# Altium footprint library 排母.PcbLib: 66 footprints (part 3 of 5)
Each footprint in its own frame and in the unit in brackets; x right, y up, seen from the top. Pads: shape width x height; smd on the part's side, far side on the other; paste and mask are expansions set on the pad; w line width, h text height; cw(c..) or ccw(c..) is an arc to the next point about the centre after c.
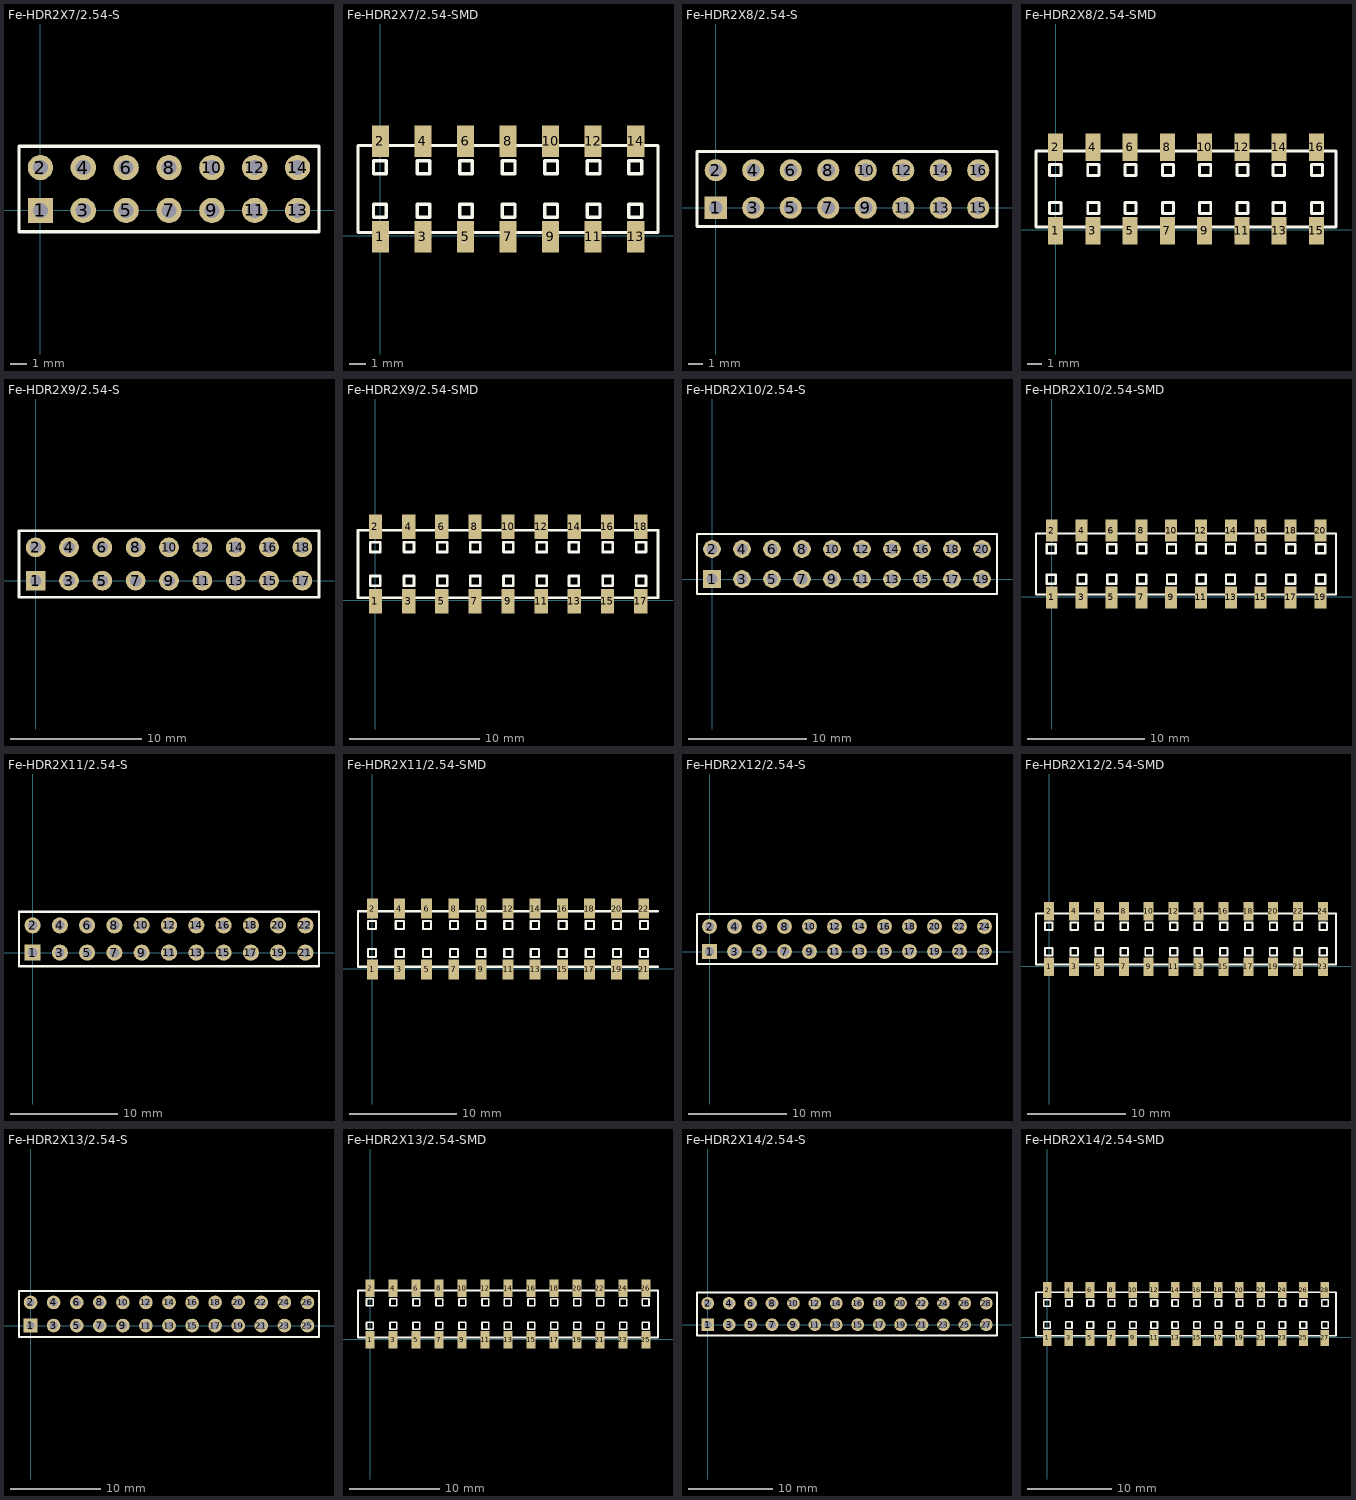
[diagram p2: the footprints below, top view; thin cyan lines are the x and y axes]

## Fe-HDR2X7/2.54-S [mm] "Connector; Header; 7x2 Position"
pads (14):
  rect 1.5x1.5 hole 0.9: 1(0,0)
  round 1.5 hole 0.9: 2(0,2.54) 3(2.54,0) 4(2.54,2.54) 5(5.08,0) 6(5.08,2.54) 7(7.62,0) 8(7.62,2.54) 9(10.16,0) 10(10.16,2.54) 11(12.7,0) 12(12.7,2.54) 13(15.24,0) 14(15.24,2.54)
Top Overlay:
  lines w0.2: -1.27,-1.27 -1.27,3.81 16.51,3.81 16.51,-1.27 -1.27,-1.27
3D body "Female-Header-2.54-Double-14.stp": height 8.5, standoff -3.2, extent -1.397,-1.19 16.633,3.81

## Fe-HDR2X7/2.54-SMD [mm]
pads (14):
  rect 1.02x1.9 smd: 1(0,-0.056) 2(0,5.644) 3(2.54,-0.056) 4(2.54,5.644) 5(5.08,-0.056) 6(5.08,5.644) 7(7.62,-0.056) 8(7.62,5.644) 9(10.16,-0.056) 10(10.16,5.644) 11(12.7,-0.056) 12(12.7,5.644) 13(15.24,-0.056) 14(15.24,5.644)
Top Overlay:
  lines w0.2: -1.34,0.194 16.57,0.194 16.57,5.394 -1.34,5.394 -1.34,0.194 ; -0.411,1.113 -0.411,1.875 0.351,1.875 0.351,1.113 -0.411,1.113 ; -0.411,3.713 -0.411,4.475 0.351,4.475 0.351,3.713 -0.411,3.713 ; 2.189,1.113 2.189,1.875 2.951,1.875 2.951,1.113 2.189,1.113 ; 2.189,3.713 2.189,4.475 2.951,4.475 2.951,3.713 2.189,3.713 ; 4.729,1.113 5.491,1.113 5.491,1.875 4.729,1.875 4.729,1.113 ; 4.729,3.713 5.491,3.713 5.491,4.475 4.729,4.475 4.729,3.713 ; 7.269,1.113 7.269,1.875 8.031,1.875 8.031,1.113 7.269,1.113 ; 7.269,3.713 7.269,4.475 8.031,4.475 8.031,3.713 7.269,3.713 ; 9.809,1.113 9.809,1.875 10.571,1.875 10.571,1.113 9.809,1.113 ; 9.809,3.713 9.809,4.475 10.571,4.475 10.571,3.713 9.809,3.713 ; 12.349,1.113 12.349,1.875 13.111,1.875 13.111,1.113 12.349,1.113 ; 12.349,3.713 12.349,4.475 13.111,4.475 13.111,3.713 12.349,3.713 ; 14.829,1.113 15.591,1.113 15.591,1.875 14.829,1.875 14.829,1.113 ; 14.829,3.713 15.591,3.713 15.591,4.475 14.829,4.475 14.829,3.713
3D body "Fe-Header2X1.STEP": height 5.15, standoff 0, extent 3.75,-0.304 6.35,6.096
3D body "Fe-Header2X1.STEP": height 5.15, standoff 0, extent 1.21,-0.304 3.81,6.096
3D body "Fe-Header2X1.STEP": height 5.15, standoff 0, extent -1.33,-0.304 1.27,6.096
3D body "Fe-Header2X1.STEP": height 5.15, standoff 0, extent 8.83,-0.304 11.43,6.096
3D body "Fe-Header2X1.STEP": height 5.15, standoff 0, extent 6.29,-0.304 8.89,6.096
3D body "Fe-Header2X1.STEP": height 5.15, standoff 0, extent 11.37,-0.304 13.97,6.096
3D body "Fe-Header2X1.STEP": height 5.15, standoff 0, extent 13.91,-0.304 16.51,6.096

## Fe-HDR2X8/2.54-S [mm] "Connector; Header; 8x2 Position"
pads (16):
  rect 1.5x1.5 hole 0.9: 1(0,0)
  round 1.5 hole 0.9: 2(0,2.54) 3(2.54,0) 4(2.54,2.54) 5(5.08,0) 6(5.08,2.54) 7(7.62,0) 8(7.62,2.54) 9(10.16,0) 10(10.16,2.54) 11(12.7,0) 12(12.7,2.54) 13(15.24,0) 14(15.24,2.54) 15(17.78,0) 16(17.78,2.54)
Top Overlay:
  lines w0.2: -1.27,-1.27 -1.27,3.81 19.05,3.81 19.05,-1.27 -1.27,-1.27
3D body "Female-Header-2.54-Double-16.stp": height 8.5, standoff -3.2, extent -1.395,-1.23 19.175,3.77

## Fe-HDR2X8/2.54-SMD [mm]
pads (16):
  rect 1.02x1.9 smd: 1(0,-0.056) 2(0,5.644) 3(2.54,-0.056) 4(2.54,5.644) 5(5.08,-0.056) 6(5.08,5.644) 7(7.62,-0.056) 8(7.62,5.644) 9(10.16,-0.056) 10(10.16,5.644) 11(12.7,-0.056) 12(12.7,5.644) 13(15.24,-0.056) 14(15.24,5.644) 15(17.78,-0.056) 16(17.78,5.644)
Top Overlay:
  lines w0.2: -1.34,0.194 -1.34,5.394 19.11,5.394 19.11,0.194 -1.34,0.194 ; -0.411,1.113 -0.411,1.875 0.351,1.875 0.351,1.113 -0.411,1.113 ; -0.411,3.713 -0.411,4.475 0.351,4.475 0.351,3.713 -0.411,3.713 ; 2.189,1.113 2.189,1.875 2.951,1.875 2.951,1.113 2.189,1.113 ; 2.189,3.713 2.189,4.475 2.951,4.475 2.951,3.713 2.189,3.713 ; 4.729,1.113 5.491,1.113 5.491,1.875 4.729,1.875 4.729,1.113 ; 4.729,3.713 5.491,3.713 5.491,4.475 4.729,4.475 4.729,3.713 ; 7.269,1.113 7.269,1.875 8.031,1.875 8.031,1.113 7.269,1.113 ; 7.269,3.713 7.269,4.475 8.031,4.475 8.031,3.713 7.269,3.713 ; 9.809,1.113 9.809,1.875 10.571,1.875 10.571,1.113 9.809,1.113 ; 9.809,3.713 9.809,4.475 10.571,4.475 10.571,3.713 9.809,3.713 ; 12.349,1.113 12.349,1.875 13.111,1.875 13.111,1.113 12.349,1.113 ; 12.349,3.713 12.349,4.475 13.111,4.475 13.111,3.713 12.349,3.713 ; 14.829,1.113 15.591,1.113 15.591,1.875 14.829,1.875 14.829,1.113 ; 14.829,3.713 15.591,3.713 15.591,4.475 14.829,4.475 14.829,3.713 ; 17.429,1.113 18.191,1.113 18.191,1.875 17.429,1.875 17.429,1.113 ; 17.429,3.713 18.191,3.713 18.191,4.475 17.429,4.475 17.429,3.713
3D body "Fe-Header2X1.STEP": height 5.15, standoff 0, extent 13.91,-0.304 16.51,6.096
3D body "Fe-Header2X1.STEP": height 5.15, standoff 0, extent 11.37,-0.304 13.97,6.096
3D body "Fe-Header2X1.STEP": height 5.15, standoff 0, extent 6.29,-0.304 8.89,6.096
3D body "Fe-Header2X1.STEP": height 5.15, standoff 0, extent 8.83,-0.304 11.43,6.096
3D body "Fe-Header2X1.STEP": height 5.15, standoff 0, extent -1.33,-0.304 1.27,6.096
3D body "Fe-Header2X1.STEP": height 5.15, standoff 0, extent 1.21,-0.304 3.81,6.096
3D body "Fe-Header2X1.STEP": height 5.15, standoff 0, extent 3.75,-0.304 6.35,6.096
3D body "Fe-Header2X1.STEP": height 5.15, standoff 0, extent 16.45,-0.304 19.05,6.096

## Fe-HDR2X9/2.54-S [mm] "Connector; Header; 9x2 Position"
pads (18):
  rect 1.5x1.5 hole 0.9: 1(0,0)
  round 1.5 hole 0.9: 2(0,2.54) 3(2.54,0) 4(2.54,2.54) 5(5.08,0) 6(5.08,2.54) 7(7.62,0) 8(7.62,2.54) 9(10.16,0) 10(10.16,2.54) 11(12.7,0) 12(12.7,2.54) 13(15.24,0) 14(15.24,2.54) 15(17.78,0) 16(17.78,2.54) 17(20.32,0) 18(20.32,2.54)
Top Overlay:
  lines w0.2: -1.27,-1.27 -1.27,3.81 21.59,3.81 21.59,-1.27 -1.27,-1.27
3D body "Female-Header-2.54-Double-18.stp": height 8.5, standoff -3.2, extent -1.397,-1.19 21.713,3.81

## Fe-HDR2X9/2.54-SMD [mm]
pads (18):
  rect 1.02x1.9 smd: 1(0,-0.056) 2(0,5.644) 3(2.54,-0.056) 4(2.54,5.644) 5(5.08,-0.056) 6(5.08,5.644) 7(7.62,-0.056) 8(7.62,5.644) 9(10.16,-0.056) 10(10.16,5.644) 11(12.7,-0.056) 12(12.7,5.644) 13(15.24,-0.056) 14(15.24,5.644) 15(17.78,-0.056) 16(17.78,5.644) 17(20.32,-0.056) 18(20.32,5.644)
Top Overlay:
  lines w0.2: -1.34,0.194 -1.34,5.394 21.65,5.394 21.65,0.194 -1.34,0.194 ; -0.411,1.113 0.351,1.113 0.351,1.875 -0.411,1.875 -0.411,1.113 ; -0.411,3.713 0.351,3.713 0.351,4.475 -0.411,4.475 -0.411,3.713 ; 2.189,1.113 2.951,1.113 2.951,1.875 2.189,1.875 2.189,1.113 ; 2.189,3.713 2.951,3.713 2.951,4.475 2.189,4.475 2.189,3.713 ; 4.729,1.113 4.729,1.875 5.491,1.875 5.491,1.113 4.729,1.113 ; 4.729,3.713 4.729,4.475 5.491,4.475 5.491,3.713 4.729,3.713 ; 7.269,1.113 8.031,1.113 8.031,1.875 7.269,1.875 7.269,1.113 ; 7.269,3.713 8.031,3.713 8.031,4.475 7.269,4.475 7.269,3.713 ; 9.809,1.113 10.571,1.113 10.571,1.875 9.809,1.875 9.809,1.113 ; 9.809,3.713 10.571,3.713 10.571,4.475 9.809,4.475 9.809,3.713 ; 12.349,1.113 13.111,1.113 13.111,1.875 12.349,1.875 12.349,1.113 ; 12.349,3.713 13.111,3.713 13.111,4.475 12.349,4.475 12.349,3.713 ; 14.829,1.113 14.829,1.875 15.591,1.875 15.591,1.113 14.829,1.113 ; 14.829,3.713 14.829,4.475 15.591,4.475 15.591,3.713 14.829,3.713 ; 17.429,1.113 17.429,1.875 18.191,1.875 18.191,1.113 17.429,1.113 ; 17.429,3.713 17.429,4.475 18.191,4.475 18.191,3.713 17.429,3.713 ; 19.969,1.113 20.731,1.113 20.731,1.875 19.969,1.875 19.969,1.113 ; 19.969,3.713 20.731,3.713 20.731,4.475 19.969,4.475 19.969,3.713
3D body "Fe-Header2X1.STEP": height 5.15, standoff 0, extent 18.99,-0.304 21.59,6.096
3D body "Fe-Header2X1.STEP": height 5.15, standoff 0, extent 16.45,-0.304 19.05,6.096
3D body "Fe-Header2X1.STEP": height 5.15, standoff 0, extent 13.91,-0.304 16.51,6.096
3D body "Fe-Header2X1.STEP": height 5.15, standoff 0, extent 11.37,-0.304 13.97,6.096
3D body "Fe-Header2X1.STEP": height 5.15, standoff 0, extent 6.29,-0.304 8.89,6.096
3D body "Fe-Header2X1.STEP": height 5.15, standoff 0, extent 8.83,-0.304 11.43,6.096
3D body "Fe-Header2X1.STEP": height 5.15, standoff 0, extent -1.33,-0.304 1.27,6.096
3D body "Fe-Header2X1.STEP": height 5.15, standoff 0, extent 1.21,-0.304 3.81,6.096
3D body "Fe-Header2X1.STEP": height 5.15, standoff 0, extent 3.75,-0.304 6.35,6.096

## Fe-HDR2X10/2.54-S [mm] "Connector; Header; 10x2 Position"
pads (20):
  rect 1.5x1.5 hole 0.9: 1(0,0)
  round 1.5 hole 0.9: 2(0,2.54) 3(2.54,0) 4(2.54,2.54) 5(5.08,0) 6(5.08,2.54) 7(7.62,0) 8(7.62,2.54) 9(10.16,0) 10(10.16,2.54) 11(12.7,0) 12(12.7,2.54) 13(15.24,0) 14(15.24,2.54) 15(17.78,0) 16(17.78,2.54) 17(20.32,0) 18(20.32,2.54) 19(22.86,0) 20(22.86,2.54)
Top Overlay:
  lines w0.2: -1.27,-1.27 -1.27,3.81 0.635,3.81 24.13,3.81 24.13,-1.27 0.635,-1.27 -1.27,-1.27
3D body "Female-Header-2.54-Double-20.stp": height 8.5, standoff -3.2, extent -1.395,-1.23 24.255,3.77

## Fe-HDR2X10/2.54-SMD [mm]
pads (20):
  rect 1.02x1.9 smd: 1(0,-0.056) 2(0,5.644) 3(2.54,-0.056) 4(2.54,5.644) 5(5.08,-0.056) 6(5.08,5.644) 7(7.62,-0.056) 8(7.62,5.644) 9(10.16,-0.056) 10(10.16,5.644) 11(12.7,-0.056) 12(12.7,5.644) 13(15.24,-0.056) 14(15.24,5.644) 15(17.78,-0.056) 16(17.78,5.644) 17(20.32,-0.056) 18(20.32,5.644) 19(22.86,-0.056) 20(22.86,5.644)
Top Overlay:
  lines w0.2: -1.34,0.194 -1.34,5.394 24.19,5.394 24.19,0.194 -1.34,0.194 ; -0.411,1.113 0.351,1.113 0.351,1.875 -0.411,1.875 -0.411,1.113 ; -0.411,3.713 0.351,3.713 0.351,4.475 -0.411,4.475 -0.411,3.713 ; 2.189,1.113 2.951,1.113 2.951,1.875 2.189,1.875 2.189,1.113 ; 2.189,3.713 2.951,3.713 2.951,4.475 2.189,4.475 2.189,3.713 ; 4.729,1.113 4.729,1.875 5.491,1.875 5.491,1.113 4.729,1.113 ; 4.729,3.713 4.729,4.475 5.491,4.475 5.491,3.713 4.729,3.713 ; 7.269,1.113 8.031,1.113 8.031,1.875 7.269,1.875 7.269,1.113 ; 7.269,3.713 8.031,3.713 8.031,4.475 7.269,4.475 7.269,3.713 ; 9.809,1.113 10.571,1.113 10.571,1.875 9.809,1.875 9.809,1.113 ; 9.809,3.713 10.571,3.713 10.571,4.475 9.809,4.475 9.809,3.713 ; 12.349,1.113 13.111,1.113 13.111,1.875 12.349,1.875 12.349,1.113 ; 12.349,3.713 13.111,3.713 13.111,4.475 12.349,4.475 12.349,3.713 ; 14.829,1.113 14.829,1.875 15.591,1.875 15.591,1.113 14.829,1.113 ; 14.829,3.713 14.829,4.475 15.591,4.475 15.591,3.713 14.829,3.713 ; 17.429,1.113 17.429,1.875 18.191,1.875 18.191,1.113 17.429,1.113 ; 17.429,3.713 17.429,4.475 18.191,4.475 18.191,3.713 17.429,3.713 ; 19.969,1.113 20.731,1.113 20.731,1.875 19.969,1.875 19.969,1.113 ; 19.969,3.713 20.731,3.713 20.731,4.475 19.969,4.475 19.969,3.713 ; 22.509,1.113 22.509,1.875 23.271,1.875 23.271,1.113 22.509,1.113 ; 22.509,3.713 22.509,4.475 23.271,4.475 23.271,3.713 22.509,3.713
3D body "Fe-Header2X1.STEP": height 5.15, standoff 0, extent 13.91,-0.304 16.51,6.096
3D body "Fe-Header2X1.STEP": height 5.15, standoff 0, extent 11.37,-0.304 13.97,6.096
3D body "Fe-Header2X1.STEP": height 5.15, standoff 0, extent 6.29,-0.304 8.89,6.096
3D body "Fe-Header2X1.STEP": height 5.15, standoff 0, extent 8.83,-0.304 11.43,6.096
3D body "Fe-Header2X1.STEP": height 5.15, standoff 0, extent -1.33,-0.304 1.27,6.096
3D body "Fe-Header2X1.STEP": height 5.15, standoff 0, extent 1.21,-0.304 3.81,6.096
3D body "Fe-Header2X1.STEP": height 5.15, standoff 0, extent 3.75,-0.304 6.35,6.096
3D body "Fe-Header2X1.STEP": height 5.15, standoff 0, extent 18.99,-0.304 21.59,6.096
3D body "Fe-Header2X1.STEP": height 5.15, standoff 0, extent 16.45,-0.304 19.05,6.096
3D body "Fe-Header2X1.STEP": height 5.15, standoff 0, extent 21.53,-0.304 24.13,6.096

## Fe-HDR2X11/2.54-S [mm] "Connector; Header; 11x2 Position"
pads (22):
  rect 1.5x1.5 hole 0.9: 1(0,0)
  round 1.5 hole 0.9: 2(0,2.54) 3(2.54,0) 4(2.54,2.54) 5(5.08,0) 6(5.08,2.54) 7(7.62,0) 8(7.62,2.54) 9(10.16,0) 10(10.16,2.54) 11(12.7,0) 12(12.7,2.54) 13(15.24,0) 14(15.24,2.54) 15(17.78,0) 16(17.78,2.54) 17(20.32,0) 18(20.32,2.54) 19(22.86,0) 20(22.86,2.54) 21(25.4,0) 22(25.4,2.54)
Top Overlay:
  lines w0.2: -1.27,-1.27 -1.27,3.81 26.67,3.81 26.67,-1.27 -1.27,-1.27
3D body "Female-Header-2.54-Double-22.stp": height 8.5, standoff -3.2, extent -1.397,-1.19 26.793,3.81

## Fe-HDR2X11/2.54-SMD [mm]
pads (22):
  rect 1.02x1.9 smd: 1(0,-0.056) 2(0,5.644) 3(2.54,-0.056) 4(2.54,5.644) 5(5.08,-0.056) 6(5.08,5.644) 7(7.62,-0.056) 8(7.62,5.644) 9(10.16,-0.056) 10(10.16,5.644) 11(12.7,-0.056) 12(12.7,5.644) 13(15.24,-0.056) 14(15.24,5.644) 15(17.78,-0.056) 16(17.78,5.644) 17(20.32,-0.056) 18(20.32,5.644) 19(22.86,-0.056) 20(22.86,5.644) 21(25.4,-0.056) 22(25.4,5.644)
Top Overlay:
  lines w0.2: 26.73,0.194 -1.34,0.194 -1.34,5.394 26.73,5.394 ; -0.411,1.113 -0.411,1.875 0.351,1.875 0.351,1.113 -0.411,1.113 ; -0.411,3.713 -0.411,4.475 0.351,4.475 0.351,3.713 -0.411,3.713 ; 2.189,1.113 2.189,1.875 2.951,1.875 2.951,1.113 2.189,1.113 ; 2.189,3.713 2.189,4.475 2.951,4.475 2.951,3.713 2.189,3.713 ; 4.729,1.113 5.491,1.113 5.491,1.875 4.729,1.875 4.729,1.113 ; 4.729,3.713 5.491,3.713 5.491,4.475 4.729,4.475 4.729,3.713 ; 7.269,1.113 7.269,1.875 8.031,1.875 8.031,1.113 7.269,1.113 ; 7.269,3.713 7.269,4.475 8.031,4.475 8.031,3.713 7.269,3.713 ; 9.809,1.113 9.809,1.875 10.571,1.875 10.571,1.113 9.809,1.113 ; 9.809,3.713 9.809,4.475 10.571,4.475 10.571,3.713 9.809,3.713 ; 12.349,1.113 12.349,1.875 13.111,1.875 13.111,1.113 12.349,1.113 ; 12.349,3.713 12.349,4.475 13.111,4.475 13.111,3.713 12.349,3.713 ; 14.829,1.113 15.591,1.113 15.591,1.875 14.829,1.875 14.829,1.113 ; 14.829,3.713 15.591,3.713 15.591,4.475 14.829,4.475 14.829,3.713 ; 17.429,1.113 18.191,1.113 18.191,1.875 17.429,1.875 17.429,1.113 ; 17.429,3.713 18.191,3.713 18.191,4.475 17.429,4.475 17.429,3.713 ; 19.969,1.113 19.969,1.875 20.731,1.875 20.731,1.113 19.969,1.113 ; 19.969,3.713 19.969,4.475 20.731,4.475 20.731,3.713 19.969,3.713 ; 22.509,1.113 23.271,1.113 23.271,1.875 22.509,1.875 22.509,1.113 ; 22.509,3.713 23.271,3.713 23.271,4.475 22.509,4.475 22.509,3.713 ; 25.049,1.113 25.811,1.113 25.811,1.875 25.049,1.875 25.049,1.113 ; 25.049,3.713 25.811,3.713 25.811,4.475 25.049,4.475 25.049,3.713
3D body "Fe-Header2X1.STEP": height 5.15, standoff 0, extent 24.07,-0.304 26.67,6.096
3D body "Fe-Header2X1.STEP": height 5.15, standoff 0, extent 16.45,-0.304 19.05,6.096
3D body "Fe-Header2X1.STEP": height 5.15, standoff 0, extent 18.99,-0.304 21.59,6.096
3D body "Fe-Header2X1.STEP": height 5.15, standoff 0, extent 21.53,-0.304 24.13,6.096
3D body "Fe-Header2X1.STEP": height 5.15, standoff 0, extent 3.75,-0.304 6.35,6.096
3D body "Fe-Header2X1.STEP": height 5.15, standoff 0, extent 1.21,-0.304 3.81,6.096
3D body "Fe-Header2X1.STEP": height 5.15, standoff 0, extent -1.33,-0.304 1.27,6.096
3D body "Fe-Header2X1.STEP": height 5.15, standoff 0, extent 8.83,-0.304 11.43,6.096
3D body "Fe-Header2X1.STEP": height 5.15, standoff 0, extent 6.29,-0.304 8.89,6.096
3D body "Fe-Header2X1.STEP": height 5.15, standoff 0, extent 11.37,-0.304 13.97,6.096
3D body "Fe-Header2X1.STEP": height 5.15, standoff 0, extent 13.91,-0.304 16.51,6.096

## Fe-HDR2X12/2.54-S [mm] "Connector; Header; 12x2 Position"
pads (24):
  rect 1.5x1.5 hole 0.9: 1(0,0)
  round 1.5 hole 0.9: 2(0,2.54) 3(2.54,0) 4(2.54,2.54) 5(5.08,0) 6(5.08,2.54) 7(7.62,0) 8(7.62,2.54) 9(10.16,0) 10(10.16,2.54) 11(12.7,0) 12(12.7,2.54) 13(15.24,0) 14(15.24,2.54) 15(17.78,0) 16(17.78,2.54) 17(20.32,0) 18(20.32,2.54) 19(22.86,0) 20(22.86,2.54) 21(25.4,0) 22(25.4,2.54) 23(27.94,0) 24(27.94,2.54)
Top Overlay:
  lines w0.2: -1.27,-1.27 -1.27,3.81 29.21,3.81 29.21,-1.27 -1.27,-1.27
3D body "Female-Header-2.54-Double-24.stp": height 8.5, standoff -3.2, extent -1.395,-1.23 29.335,3.77

## Fe-HDR2X12/2.54-SMD [mm]
pads (24):
  rect 1.02x1.9 smd: 1(0,-0.056) 2(0,5.644) 3(2.54,-0.056) 4(2.54,5.644) 5(5.08,-0.056) 6(5.08,5.644) 7(7.62,-0.056) 8(7.62,5.644) 9(10.16,-0.056) 10(10.16,5.644) 11(12.7,-0.056) 12(12.7,5.644) 13(15.24,-0.056) 14(15.24,5.644) 15(17.78,-0.056) 16(17.78,5.644) 17(20.32,-0.056) 18(20.32,5.644) 19(22.86,-0.056) 20(22.86,5.644) 21(25.4,-0.056) 22(25.4,5.644) 23(27.94,-0.056) 24(27.94,5.644)
Top Overlay:
  lines w0.2: -1.34,0.194 -1.34,5.394 29.27,5.394 29.27,0.194 -1.34,0.194 ; -0.411,1.113 0.351,1.113 0.351,1.875 -0.411,1.875 -0.411,1.113 ; -0.411,3.713 0.351,3.713 0.351,4.475 -0.411,4.475 -0.411,3.713 ; 2.189,1.113 2.951,1.113 2.951,1.875 2.189,1.875 2.189,1.113 ; 2.189,3.713 2.951,3.713 2.951,4.475 2.189,4.475 2.189,3.713 ; 4.729,1.113 4.729,1.875 5.491,1.875 5.491,1.113 4.729,1.113 ; 4.729,3.713 4.729,4.475 5.491,4.475 5.491,3.713 4.729,3.713 ; 7.269,1.113 8.031,1.113 8.031,1.875 7.269,1.875 7.269,1.113 ; 7.269,3.713 8.031,3.713 8.031,4.475 7.269,4.475 7.269,3.713 ; 9.809,1.113 10.571,1.113 10.571,1.875 9.809,1.875 9.809,1.113 ; 9.809,3.713 10.571,3.713 10.571,4.475 9.809,4.475 9.809,3.713 ; 12.349,1.113 13.111,1.113 13.111,1.875 12.349,1.875 12.349,1.113 ; 12.349,3.713 13.111,3.713 13.111,4.475 12.349,4.475 12.349,3.713 ; 14.829,1.113 14.829,1.875 15.591,1.875 15.591,1.113 14.829,1.113 ; 14.829,3.713 14.829,4.475 15.591,4.475 15.591,3.713 14.829,3.713 ; 17.429,1.113 17.429,1.875 18.191,1.875 18.191,1.113 17.429,1.113 ; 17.429,3.713 17.429,4.475 18.191,4.475 18.191,3.713 17.429,3.713 ; 19.969,1.113 20.731,1.113 20.731,1.875 19.969,1.875 19.969,1.113 ; 19.969,3.713 20.731,3.713 20.731,4.475 19.969,4.475 19.969,3.713 ; 22.509,1.113 22.509,1.875 23.271,1.875 23.271,1.113 22.509,1.113 ; 22.509,3.713 22.509,4.475 23.271,4.475 23.271,3.713 22.509,3.713 ; 25.049,1.113 25.049,1.875 25.811,1.875 25.811,1.113 25.049,1.113 ; 25.049,3.713 25.049,4.475 25.811,4.475 25.811,3.713 25.049,3.713 ; 27.589,1.113 27.589,1.875 28.351,1.875 28.351,1.113 27.589,1.113 ; 27.589,3.713 27.589,4.475 28.351,4.475 28.351,3.713 27.589,3.713
3D body "Fe-Header2X1.STEP": height 5.15, standoff 0, extent 24.07,-0.304 26.67,6.096
3D body "Fe-Header2X1.STEP": height 5.15, standoff 0, extent 26.61,-0.304 29.21,6.096
3D body "Fe-Header2X1.STEP": height 5.15, standoff 0, extent 16.45,-0.304 19.05,6.096
3D body "Fe-Header2X1.STEP": height 5.15, standoff 0, extent 18.99,-0.304 21.59,6.096
3D body "Fe-Header2X1.STEP": height 5.15, standoff 0, extent 21.53,-0.304 24.13,6.096
3D body "Fe-Header2X1.STEP": height 5.15, standoff 0, extent 3.75,-0.304 6.35,6.096
3D body "Fe-Header2X1.STEP": height 5.15, standoff 0, extent 1.21,-0.304 3.81,6.096
3D body "Fe-Header2X1.STEP": height 5.15, standoff 0, extent -1.33,-0.304 1.27,6.096
3D body "Fe-Header2X1.STEP": height 5.15, standoff 0, extent 8.83,-0.304 11.43,6.096
3D body "Fe-Header2X1.STEP": height 5.15, standoff 0, extent 6.29,-0.304 8.89,6.096
3D body "Fe-Header2X1.STEP": height 5.15, standoff 0, extent 11.37,-0.304 13.97,6.096
3D body "Fe-Header2X1.STEP": height 5.15, standoff 0, extent 13.91,-0.304 16.51,6.096

## Fe-HDR2X13/2.54-S [mm] "Connector; Header; 13x2 Position"
pads (26):
  rect 1.5x1.5 hole 0.9: 1(0,0)
  round 1.5 hole 0.9: 2(0,2.54) 3(2.54,0) 4(2.54,2.54) 5(5.08,0) 6(5.08,2.54) 7(7.62,0) 8(7.62,2.54) 9(10.16,0) 10(10.16,2.54) 11(12.7,0) 12(12.7,2.54) 13(15.24,0) 14(15.24,2.54) 15(17.78,0) 16(17.78,2.54) 17(20.32,0) 18(20.32,2.54) 19(22.86,0) 20(22.86,2.54) 21(25.4,0) 22(25.4,2.54) 23(27.94,0) 24(27.94,2.54) 25(30.48,0) 26(30.48,2.54)
Top Overlay:
  lines w0.2: -1.27,-1.27 31.75,-1.27 31.75,3.81 -1.27,3.81 -1.27,-1.27
3D body "Female-Header-2.54-Double-26.stp": height 8.5, standoff -3.2, extent -1.397,-1.23 31.873,3.77

## Fe-HDR2X13/2.54-SMD [mm]
pads (26):
  rect 1.02x1.9 smd: 1(0,-0.056) 2(0,5.644) 3(2.54,-0.056) 4(2.54,5.644) 5(5.08,-0.056) 6(5.08,5.644) 7(7.62,-0.056) 8(7.62,5.644) 9(10.16,-0.056) 10(10.16,5.644) 11(12.7,-0.056) 12(12.7,5.644) 13(15.24,-0.056) 14(15.24,5.644) 15(17.78,-0.056) 16(17.78,5.644) 17(20.32,-0.056) 18(20.32,5.644) 19(22.86,-0.056) 20(22.86,5.644) 21(25.4,-0.056) 22(25.4,5.644) 23(27.94,-0.056) 24(27.94,5.644) 25(30.48,-0.056) 26(30.48,5.644)
Top Overlay:
  lines w0.2: -1.34,0.194 31.81,0.194 31.81,5.394 -1.34,5.394 -1.34,0.194 ; -0.411,1.113 0.351,1.113 0.351,1.875 -0.411,1.875 -0.411,1.113 ; -0.411,3.713 0.351,3.713 0.351,4.475 -0.411,4.475 -0.411,3.713 ; 2.189,1.113 2.951,1.113 2.951,1.875 2.189,1.875 2.189,1.113 ; 2.189,3.713 2.951,3.713 2.951,4.475 2.189,4.475 2.189,3.713 ; 4.729,1.113 4.729,1.875 5.491,1.875 5.491,1.113 4.729,1.113 ; 4.729,3.713 4.729,4.475 5.491,4.475 5.491,3.713 4.729,3.713 ; 7.269,1.113 8.031,1.113 8.031,1.875 7.269,1.875 7.269,1.113 ; 7.269,3.713 8.031,3.713 8.031,4.475 7.269,4.475 7.269,3.713 ; 9.809,1.113 10.571,1.113 10.571,1.875 9.809,1.875 9.809,1.113 ; 9.809,3.713 10.571,3.713 10.571,4.475 9.809,4.475 9.809,3.713 ; 12.349,1.113 13.111,1.113 13.111,1.875 12.349,1.875 12.349,1.113 ; 12.349,3.713 13.111,3.713 13.111,4.475 12.349,4.475 12.349,3.713 ; 14.829,1.113 14.829,1.875 15.591,1.875 15.591,1.113 14.829,1.113 ; 14.829,3.713 14.829,4.475 15.591,4.475 15.591,3.713 14.829,3.713 ; 17.429,1.113 17.429,1.875 18.191,1.875 18.191,1.113 17.429,1.113 ; 17.429,3.713 17.429,4.475 18.191,4.475 18.191,3.713 17.429,3.713 ; 19.969,1.113 20.731,1.113 20.731,1.875 19.969,1.875 19.969,1.113 ; 19.969,3.713 20.731,3.713 20.731,4.475 19.969,4.475 19.969,3.713 ; 22.509,1.113 22.509,1.875 23.271,1.875 23.271,1.113 22.509,1.113 ; 22.509,3.713 22.509,4.475 23.271,4.475 23.271,3.713 22.509,3.713 ; 25.049,1.113 25.049,1.875 25.811,1.875 25.811,1.113 25.049,1.113 ; 25.049,3.713 25.049,4.475 25.811,4.475 25.811,3.713 25.049,3.713 ; 27.589,1.113 27.589,1.875 28.351,1.875 28.351,1.113 27.589,1.113 ; 27.589,3.713 27.589,4.475 28.351,4.475 28.351,3.713 27.589,3.713 ; 30.069,1.113 30.069,1.875 30.831,1.875 30.831,1.113 30.069,1.113 ; 30.069,3.713 30.069,4.475 30.831,4.475 30.831,3.713 30.069,3.713
3D body "Fe-Header2X1.STEP": height 5.15, standoff 0, extent 29.15,-0.304 31.75,6.096
3D body "Fe-Header2X1.STEP": height 5.15, standoff 0, extent 24.07,-0.304 26.67,6.096
3D body "Fe-Header2X1.STEP": height 5.15, standoff 0, extent 26.61,-0.304 29.21,6.096
3D body "Fe-Header2X1.STEP": height 5.15, standoff 0, extent 16.45,-0.304 19.05,6.096
3D body "Fe-Header2X1.STEP": height 5.15, standoff 0, extent 18.99,-0.304 21.59,6.096
3D body "Fe-Header2X1.STEP": height 5.15, standoff 0, extent 21.53,-0.304 24.13,6.096
3D body "Fe-Header2X1.STEP": height 5.15, standoff 0, extent 3.75,-0.304 6.35,6.096
3D body "Fe-Header2X1.STEP": height 5.15, standoff 0, extent 1.21,-0.304 3.81,6.096
3D body "Fe-Header2X1.STEP": height 5.15, standoff 0, extent -1.33,-0.304 1.27,6.096
3D body "Fe-Header2X1.STEP": height 5.15, standoff 0, extent 8.83,-0.304 11.43,6.096
3D body "Fe-Header2X1.STEP": height 5.15, standoff 0, extent 6.29,-0.304 8.89,6.096
3D body "Fe-Header2X1.STEP": height 5.15, standoff 0, extent 11.37,-0.304 13.97,6.096
3D body "Fe-Header2X1.STEP": height 5.15, standoff 0, extent 13.91,-0.304 16.51,6.096

## Fe-HDR2X14/2.54-S [mm] "Connector; Header; 14x2 Position"
pads (28):
  rect 1.5x1.5 hole 0.9: 1(0,0)
  round 1.5 hole 0.9: 2(0,2.54) 3(2.54,0) 4(2.54,2.54) 5(5.08,0) 6(5.08,2.54) 7(7.62,0) 8(7.62,2.54) 9(10.16,0) 10(10.16,2.54) 11(12.7,0) 12(12.7,2.54) 13(15.24,0) 14(15.24,2.54) 15(17.78,0) 16(17.78,2.54) 17(20.32,0) 18(20.32,2.54) 19(22.86,0) 20(22.86,2.54) 21(25.4,0) 22(25.4,2.54) 23(27.94,0) 24(27.94,2.54) 25(30.48,0) 26(30.48,2.54) 27(33.02,0) 28(33.02,2.54)
Top Overlay:
  lines w0.2: -1.27,-1.27 34.29,-1.27 34.29,3.81 -1.27,3.81 -1.27,-1.27
3D body "Female-Header-2.54-Double-28.stp": height 8.5, standoff -3.2, extent -1.397,-1.23 34.413,3.77

## Fe-HDR2X14/2.54-SMD [mm]
pads (28):
  rect 1.02x1.9 smd: 1(0,-0.056) 2(0,5.644) 3(2.54,-0.056) 4(2.54,5.644) 5(5.08,-0.056) 6(5.08,5.644) 7(7.62,-0.056) 8(7.62,5.644) 9(10.16,-0.056) 10(10.16,5.644) 11(12.7,-0.056) 12(12.7,5.644) 13(15.24,-0.056) 14(15.24,5.644) 15(17.78,-0.056) 16(17.78,5.644) 17(20.32,-0.056) 18(20.32,5.644) 19(22.86,-0.056) 20(22.86,5.644) 21(25.4,-0.056) 22(25.4,5.644) 23(27.94,-0.056) 24(27.94,5.644) 25(30.48,-0.056) 26(30.48,5.644) 27(33.02,-0.056) 28(33.02,5.644)
Top Overlay:
  lines w0.2: -1.34,0.194 -1.34,5.394 34.35,5.394 34.35,0.194 -1.34,0.194 ; -0.411,1.113 0.351,1.113 0.351,1.875 -0.411,1.875 -0.411,1.113 ; -0.411,3.713 -0.411,4.475 0.351,4.475 0.351,3.713 -0.411,3.713 ; 2.189,1.113 2.951,1.113 2.951,1.875 2.189,1.875 2.189,1.113 ; 2.189,3.713 2.189,4.475 2.951,4.475 2.951,3.713 2.189,3.713 ; 4.729,1.113 4.729,1.875 5.491,1.875 5.491,1.113 4.729,1.113 ; 4.729,3.713 4.729,4.475 5.491,4.475 5.491,3.713 4.729,3.713 ; 7.269,1.113 8.031,1.113 8.031,1.875 7.269,1.875 7.269,1.113 ; 7.269,3.713 7.269,4.475 8.031,4.475 8.031,3.713 7.269,3.713 ; 9.809,1.113 10.571,1.113 10.571,1.875 9.809,1.875 9.809,1.113 ; 9.809,3.713 9.809,4.475 10.571,4.475 10.571,3.713 9.809,3.713 ; 12.349,1.113 13.111,1.113 13.111,1.875 12.349,1.875 12.349,1.113 ; 12.349,3.713 12.349,4.475 13.111,4.475 13.111,3.713 12.349,3.713 ; 14.829,1.113 14.829,1.875 15.591,1.875 15.591,1.113 14.829,1.113 ; 14.829,3.713 14.829,4.475 15.591,4.475 15.591,3.713 14.829,3.713 ; 17.429,1.113 17.429,1.875 18.191,1.875 18.191,1.113 17.429,1.113 ; 17.429,3.713 17.429,4.475 18.191,4.475 18.191,3.713 17.429,3.713 ; 19.969,1.113 20.731,1.113 20.731,1.875 19.969,1.875 19.969,1.113 ; 19.969,3.713 20.731,3.713 20.731,4.475 19.969,4.475 19.969,3.713 ; 22.509,1.113 22.509,1.875 23.271,1.875 23.271,1.113 22.509,1.113 ; 22.509,3.713 22.509,4.475 23.271,4.475 23.271,3.713 22.509,3.713 ; 25.049,1.113 25.049,1.875 25.811,1.875 25.811,1.113 25.049,1.113 ; 25.049,3.713 25.049,4.475 25.811,4.475 25.811,3.713 25.049,3.713 ; 27.589,1.113 27.589,1.875 28.351,1.875 28.351,1.113 27.589,1.113 ; 27.589,3.713 27.589,4.475 28.351,4.475 28.351,3.713 27.589,3.713 ; 30.069,1.113 30.069,1.875 30.831,1.875 30.831,1.113 30.069,1.113 ; 30.069,3.713 30.069,4.475 30.831,4.475 30.831,3.713 30.069,3.713 ; 32.669,1.113 32.669,1.875 33.431,1.875 33.431,1.113 32.669,1.113 ; 32.669,3.713 32.669,4.475 33.431,4.475 33.431,3.713 32.669,3.713
3D body "Fe-Header2X1.STEP": height 5.15, standoff 0, extent 31.69,-0.558 34.29,5.842
3D body "Fe-Header2X1.STEP": height 5.15, standoff 0, extent 29.15,-0.558 31.75,5.842
3D body "Fe-Header2X1.STEP": height 5.15, standoff 0, extent 24.07,-0.558 26.67,5.842
3D body "Fe-Header2X1.STEP": height 5.15, standoff 0, extent 26.61,-0.558 29.21,5.842
3D body "Fe-Header2X1.STEP": height 5.15, standoff 0, extent 16.45,-0.558 19.05,5.842
3D body "Fe-Header2X1.STEP": height 5.15, standoff 0, extent 18.99,-0.558 21.59,5.842
3D body "Fe-Header2X1.STEP": height 5.15, standoff 0, extent 21.53,-0.558 24.13,5.842
3D body "Fe-Header2X1.STEP": height 5.15, standoff 0, extent 3.75,-0.558 6.35,5.842
3D body "Fe-Header2X1.STEP": height 5.15, standoff 0, extent 1.21,-0.558 3.81,5.842
3D body "Fe-Header2X1.STEP": height 5.15, standoff 0, extent -1.33,-0.558 1.27,5.842
3D body "Fe-Header2X1.STEP": height 5.15, standoff 0, extent 8.83,-0.558 11.43,5.842
3D body "Fe-Header2X1.STEP": height 5.15, standoff 0, extent 6.29,-0.558 8.89,5.842
3D body "Fe-Header2X1.STEP": height 5.15, standoff 0, extent 11.37,-0.558 13.97,5.842
3D body "Fe-Header2X1.STEP": height 5.15, standoff 0, extent 13.91,-0.558 16.51,5.842